# Altium footprint library Connectors.PcbLib: 319 footprints (part 4 of 20)
Each footprint in its own frame and in the unit in brackets; x right, y up, seen from the top. Pads: shape width x height; smd on the part's side, far side on the other; paste and mask are expansions set on the pad; w line width, h text height; cw(c..) or ccw(c..) is an arc to the next point about the centre after c.
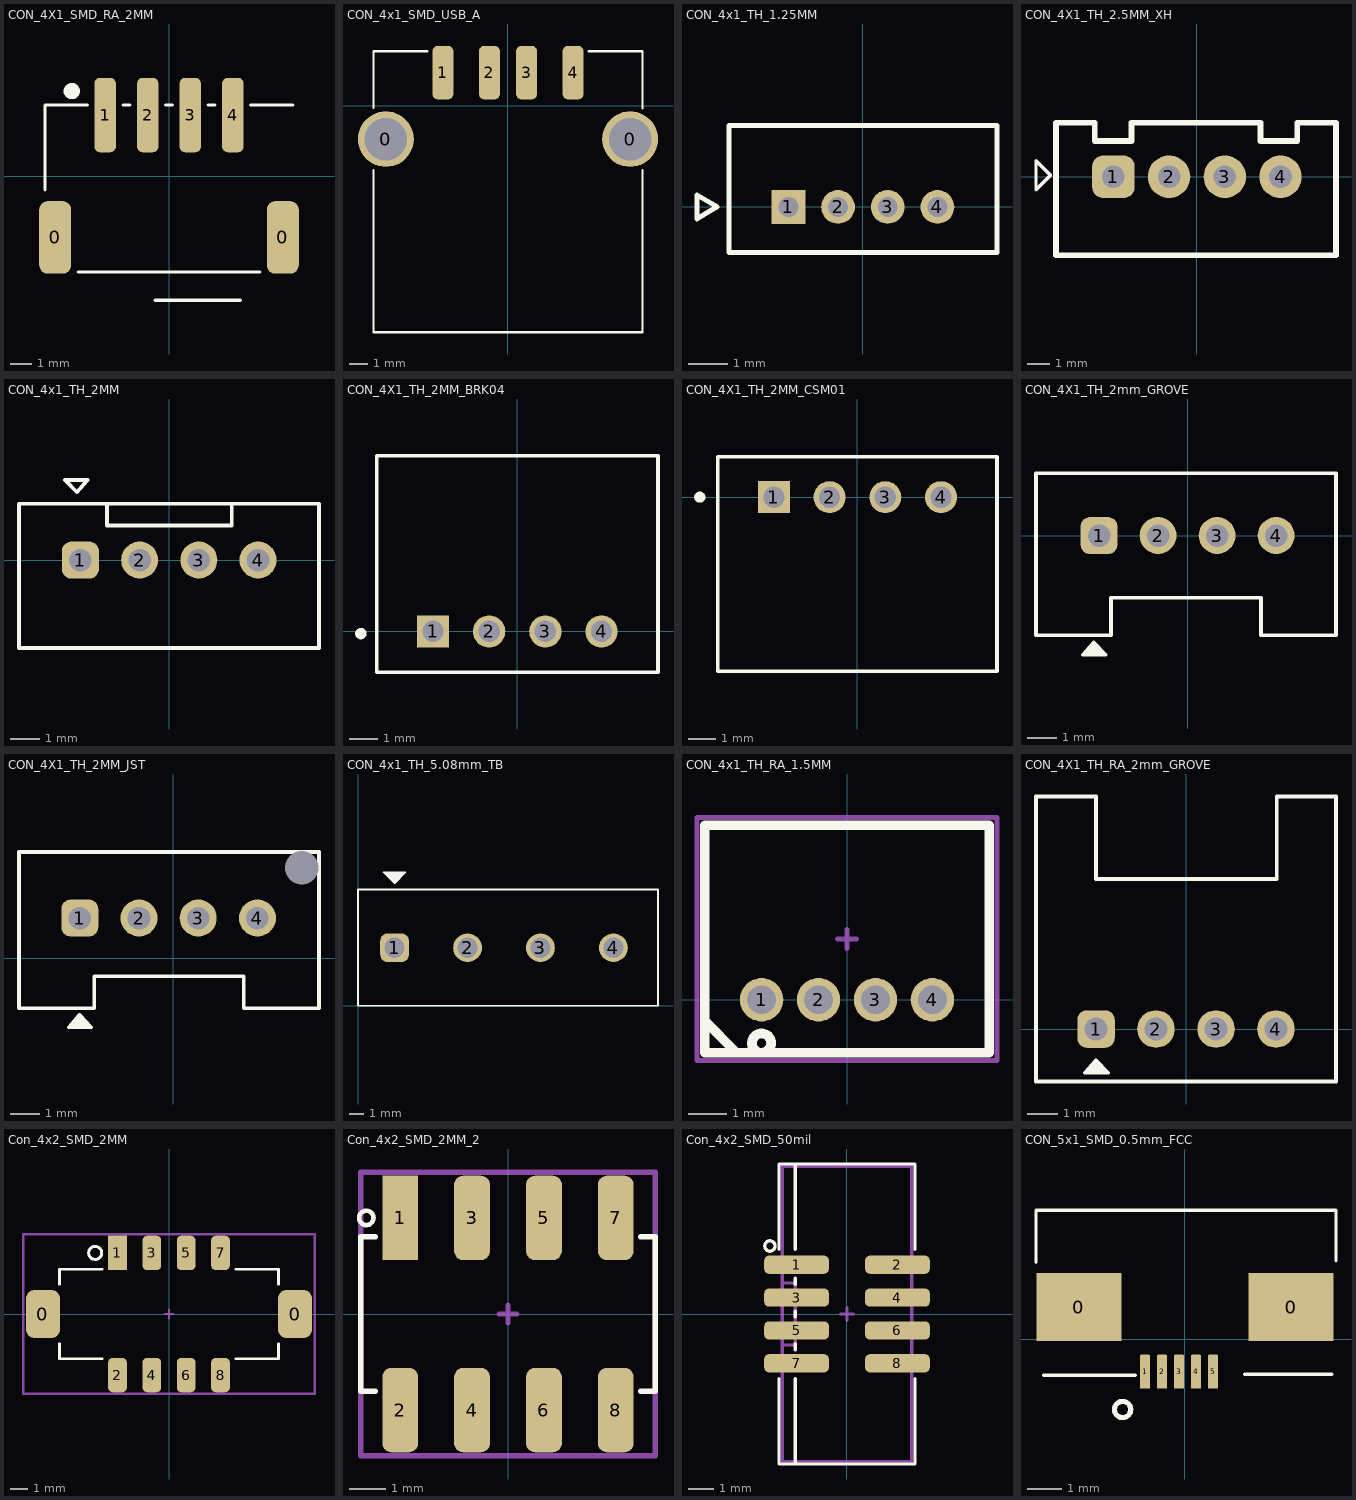
[diagram p3: the footprints below, top view; thin cyan lines are the x and y axes]

## CON_4X1_SMD_RA_2MM [mm] "20221104 / E.Naranjo"
pads (6):
  rrect50% 1.5x3.4 smd: 0(-5.35,-2.875) 0(5.35,-2.875)
  rrect50% 1x3.5 smd: 1(-3,2.875) 2(-1,2.875) 3(1,2.875) 4(3,2.875)
Top Overlay:
  circle w0.508: c-4.57,4 r0.127
  lines w0.152: -5.827,-0.642 -5.827,3.352 -3.833,3.352 ; -4.262,-4.502 4.262,-4.502 ; -2.167,3.352 -1.833,3.352 ; -0.642,-5.827 3.352,-5.827 ; -0.167,3.352 0.167,3.352 ; 1.833,3.352 2.167,3.352 ; 3.833,3.352 5.827,3.352
3D body "1775469-4.stp": height 5.65, standoff 0.05, extent -5.695,-4.375 5.705,4.225

## CON_4x1_SMD_USB_A [mm] "20190328 / V-A.Patino"
pads (6):
  round 3 hole 2.286: 0(-6.57,-1.79) 0(6.57,-1.79)
  rrect50% 1.12x2.88 smd: 1(-3.5,1.79) 2(-1,1.79) 3(1,1.79) 4(3.5,1.79)
Top Overlay:
  lines w0.127: -7.239,-3.468 -7.239,-12.18 7.239,-12.18 7.239,-3.468 ; -7.239,-0.115 -7.239,2.933 -4.343,2.933 ; 4.343,2.933 7.239,2.933 7.239,-0.14
3D body "USB_SMD.stp": height 7.6, standoff -2.71, extent -7.25,-12.083 7.25,2.928

## CON_4x1_TH_1.25MM [mm] "/ 20221116 / J-A.Sepulveda"
pads (4):
  rect 0.85x0.85 / inner round 0.85 / far side rect 0.85x0.85 hole 0.5 mask+0.076: 1(-1.875,0)
  round 0.85 hole 0.5 mask+0.076: 2(-0.625,0) 3(0.625,0) 4(1.875,0)
Top Overlay:
  lines w0.127: -4.175,-0.3 -3.675,0 -4.175,0.3 -4.175,-0.3 ; -3.375,-1.15 -3.375,2.05 3.375,2.05 3.375,-1.15 -3.375,-1.15
3D body "530470410--3DModel-STEP-231308.STEP": height 4.21, standoff -2.29, extent -3.375,-1.15 3.375,2.05

## CON_4X1_TH_2.5MM_XH [mm] "/20201013/C-A.Serna.A"
height 9.8
pads (4):
  rrect50% 1.905x1.905 hole 1.016: 1(-3.75,0)
  round 1.905 hole 1.016: 2(-1.25,0) 3(1.25,0) 4(3.75,0)
Top Overlay:
  lines w0.152: -7.225,-0.585 -6.575,0.065 -7.225,0.715 -7.225,-0.585
  lines w0.254: -6.33,-3.53 6.24,-3.53 6.24,2.43 4.502,2.43 4.502,1.604 2.851,1.604 2.851,2.43 -2.941,2.43 -2.941,1.604 -4.592,1.604 -4.592,2.43 -6.33,2.43 -6.33,-3.53
3D body "xhp-4.STEP": height 9.43, standoff 1.48, extent -6.158,-3.36 6.238,2.33
3D body "User Library-jst-b4b-xh-a-1.step": height 7.15, standoff -3.25, extent -6.18,-3.415 6.22,2.335

## CON_4x1_TH_2MM [mm] "/20210803/J-E.Pachon"
pads (4):
  rrect50% 1.25x1.25 hole 0.762: 1(-3,0)
  round 1.25 hole 0.762: 2(-1,0) 3(1,0) 4(3,0)
Top Overlay:
  lines w0.127: -2.1,1.88 -2.1,1.17 2.115,1.17 2.115,1.9 ; -5.075,-2.97 5.06,-2.97 5.06,1.9 -5.075,1.9 -5.075,-2.97 ; -3.517,2.705 -3.121,2.291 -2.755,2.705 -3.517,2.705
3D body "B4B-PH-K-S.step": height 6, standoff -3.4, extent -4.96,-2.83 4.94,1.87

## CON_4X1_TH_2MM_BRK04 [mm] "/20210216/M-C.Calderon"
pads (4):
  rect 1.15x1.15 hole 0.762: 1(-3,0)
  round 1.15 hole 0.762: 2(-1,0) 3(1,0) 4(3,0)
Top Overlay:
  circle w0.2: c-5.57,-0.08 r0.1
  lines w0.127: -5.01,-1.45 -5.01,6.25 5.01,6.25 5.01,-1.45 -5.01,-1.45
3D body "c-440055-4-b3-3d.stp": height 4.96, standoff -3.39, extent -4.99,-1.45 5.01,6.25

## CON_4X1_TH_2MM_CSM01 [mm] "/20210121/V-A.Patino"
pads (4):
  rect 1.15x1.15 hole 0.762: 1(-3,0)
  round 1.15 hole 0.762: 2(-1,0) 3(1,0) 4(3,0)
Top Overlay:
  circle w0.2: c-5.66,0 r0.1
  lines w0.127: -5.01,-6.25 -5.01,1.45 5.01,1.45 5.01,-6.25 -5.01,-6.25
3D body "c-440055-4-b3-3d.stp": height 4.96, standoff -3.39, extent -5.01,-6.25 4.99,1.45

## CON_4X1_TH_2mm_GROVE [mm] "/ 20190222 / C-A.Serna.A"
pads (4):
  rrect50% 1.25x1.25 hole 0.762: 1(-3,0)
  round 1.25 hole 0.762: 2(-1,0) 3(1,0) 4(3,0)
Top Overlay:
  region: -3.544,-4.037 -2.782,-4.037 -3.177,-3.623
  lines w0.127: -5.134,-3.378 -5.134,2.108 5.026,2.108 5.026,1.372 5.026,-3.378 2.486,-3.378 2.486,-2.106 -2.594,-2.106 -2.594,-3.378 -5.134,-3.378 ; -3.544,-4.037 -2.782,-4.037 -3.177,-3.623 -3.544,-4.037
3D body "Grove_straight_connector.STEP": height 8.1, standoff -3.13, extent -5.025,-3.243 5.025,2.007

## CON_4X1_TH_2MM_JST [mm] "/ 20190222 / C-A.Serna.A"
pads (5):
  rrect50% 1.25x1.25 hole 0.762: 1(-3.15,1.35)
  round 1.25 hole 0.762: 2(-1.15,1.35) 3(0.85,1.35) 4(2.85,1.35)
  round 1.1 hole 1.143 paste-2539.97 mask+0.102: ""(4.35,3.05)
Top Overlay:
  region: -3.524,-2.337 -2.762,-2.337 -3.157,-1.923
  lines w0.127: -5.205,-1.698 -5.205,3.585 4.93,3.585 4.93,2.671 4.93,-1.698 2.39,-1.698 2.39,-0.62 -2.665,-0.62 -2.665,-1.698 -5.205,-1.698 ; -3.524,-2.337 -2.762,-2.337 -3.157,-1.923 -3.524,-2.337
3D body "Custom_Connector.step": height 7.72, standoff -2.98, extent -5.15,-1.75 4.85,3.55

## CON_4x1_TH_5.08mm_TB [mm] "/ 20231112 / J.Jaramillo"
height 0.31
pads (4):
  rrect50% 2x2 hole 1.397: 1(2.547,4.045)
  round 2 hole 1.397: 2(7.627,4.045) 3(12.707,4.045) 4(17.787,4.045)
Top Overlay:
  region: 1.785,9.307 3.309,9.307 2.547,8.545
  lines w0.127: 0,0 0,8.1 20.89,8.1 20.89,0 0,0 ; 1.785,9.307 2.547,8.545 3.309,9.307 1.785,9.307
3D body "1729144.stp": height 10, standoff -3.5, extent 0,0 20.89,8.1

## CON_4x1_TH_RA_1.5MM [mil] "/20200527/H-D.Garcia"
pads (4):
  round 45 hole 30: 1(-88.58,0) 2(-29.53,0) 3(29.53,0) 4(88.58,0)
Top Overlay:
  circle w10: c-88.58,-44.97 r10
  lines w10: -147.64,-21.65 -114.37,-54.92 ; -147.64,-55.12 -147.64,181.1 147.64,181.1 147.64,-55.12 -147.64,-55.12
Mechanical 15:
  lines w5: -9.84,62.99 9.84,62.99 ; 0,53.15 0,72.83 ; -155.51,-62.99 155.51,-62.99 155.51,188.98 -155.51,188.98 -155.51,-62.99
3D body "S4B-ZR.STEP": height 146.17, standoff -105.79, extent -147.64,-55.12 147.64,181.1

## CON_4X1_TH_RA_2mm_GROVE [mm] "/ 20190408 / L-A Boulanger"
height 5
pads (4):
  rrect50% 1.25x1.25 hole 0.762: 1(-3,0)
  round 1.25 hole 0.762: 2(-1,0) 3(1,0) 4(3,0)
Top Overlay:
  region: -3.367,-1.457 -2.605,-1.457 -3,-1.043
  lines w0.127: -5,-1.75 -5,7.75 -3,7.75 -3,5 3.026,5 3.026,7.75 5,7.75 5,-1.75 -5,-1.75 ; -3.367,-1.457 -3,-1.043 -2.605,-1.457 -3.367,-1.457

## Con_4x2_SMD_2MM [mil] "/ 20230106 / H-D.Garcia"
pads (10):
  rrect50% 79x110 smd: 0(-289,0) 0(289,0)
  rect 43x79 smd: 1(-118.11,140)
  rrect50% 43x79 smd: 2(-118.11,-140) 3(-39.37,140) 4(-39.37,-140) 5(39.37,140) 6(39.37,-140) 7(118.11,140) 8(118.11,-140)
Top Overlay:
  circle w7: c-169.29,140 r15
  lines w6: -251,-68.1 -251,-103 -152.71,-103 ; -251,68.1 -251,103 -152.71,103 ; 152.71,-103 251,-103 251,-68.1 ; 152.71,103 251,103 251,68.1
Mechanical 15:
  lines w5: -9.84,0 9.84,0 ; 0,-9.84 0,9.84
  lines w6: -334.65,-183.07 334.65,-183.07 334.65,183.07 -334.65,183.07 -334.65,-183.07
3D body "DF11CZ-8DS-2V(22).stp": height 234.75, standoff 0.5, extent -305.12,-157.48 305.12,157.48

## Con_4x2_SMD_2MM_2 [mm] "/ 20230106 / H-D.Garcia"
pads (8):
  rect 1x2.35 smd paste+0 mask+0.051: 1(-3,2.675)
  rrect50% 1x2.35 smd paste+0 mask+0.051: 2(-3,-2.675) 3(-1,2.675) 4(-1,-2.675) 5(1,2.675) 6(1,-2.675) 7(3,2.675) 8(3,-2.675)
Top Overlay:
  circle w0.127: c-3.944,2.675 r0.2
  lines w0.152: -3.7,-2.15 -4.1,-2.15 -4.1,2.15 -3.7,2.15 ; 3.7,-2.15 4.1,-2.15 4.1,2.15 3.7,2.15
Mechanical 15:
  lines w0.127: -0.25,0 0.25,0 ; 0,-0.25 0,0.25
  lines w0.152: -4.1,-3.95 4.1,-3.95 4.1,3.95 -4.1,3.95 -4.1,-3.95
3D body "c-2314844-8-a-3d.stp": height 4.7, standoff 0.02, extent -4,-3.33 4,3.33

## Con_4x2_SMD_50mil [mm] "/ 20190313 / H-D.Garcia"
pads (8):
  rrect50% 2.5x0.7 smd: 1(-1.95,1.905) 2(1.95,1.905) 3(-1.95,0.635) 4(1.95,0.635) 5(-1.95,-0.635) 6(1.95,-0.635) 7(-1.95,-1.905) 8(1.95,-1.905)
Top Overlay:
  circle w0.127: c-2.98,2.63 r0.2
  lines w0.127: -2.627,-2.5 -2.627,-5.8 2.627,-5.8 2.627,-2.5 ; -2.627,2.5 -2.627,5.8 2.627,5.8 2.627,2.5 ; -2,-5.8 -2,-2.5 ; -2,-1.39 -2,-1.15 ; -2,-0.12 -2,0.12 ; -2,1.15 -2,1.39 ; -2,2.5 -2,5.8
Mechanical 1:
  lines w0.127: -2.5,-1.2 -2,-1.2 -2,1.2 -2.5,1.2 ; -2.5,-5.7 -2.5,5.7 2.5,5.7 2.5,-5.7 -2.5,-5.7
Mechanical 15:
  lines w0.127: -0.25,0 0.25,0 ; 0,-0.25 0,0.25
3D body "bh1d27-2.stp": height 5.27, standoff 0.01, extent -2.94,-5.7 2.94,5.7

## CON_5x1_SMD_0.5mm_FCC [mm] "/20210126/J-E.Pachon"
pads (7):
  rect 2.5x2 smd: 0(-3.125,0.95) 0(3.125,0.95)
  rrect20% 0.3x1 smd mask+0.076: 1(-1.175,-0.95) 2(-0.675,-0.95) 3(-0.175,-0.95) 4(0.325,-0.95) 5(0.825,-0.95)
Top Overlay:
  circle w0.152: c-1.836,-2.062 r0.24
  lines w0.102: -4.385,2.268 -4.385,3.8 4.445,3.8 4.445,2.318 ; -4.159,-1.052 -1.466,-1.052 ; 1.76,-1.03 4.325,-1.03
3D body "545500571.stp": height 1.19, standoff -0.01, extent -4.015,-1.15 3.685,3.85